# Altium footprint library TitansLib.PcbLib: 333 footprints (part 20 of 21)
Each footprint in its own frame and in the unit in brackets; x right, y up, seen from the top. Pads: shape width x height; smd on the part's side, far side on the other; paste and mask are expansions set on the pad; w line width, h text height; cw(c..) or ccw(c..) is an arc to the next point about the centre after c.
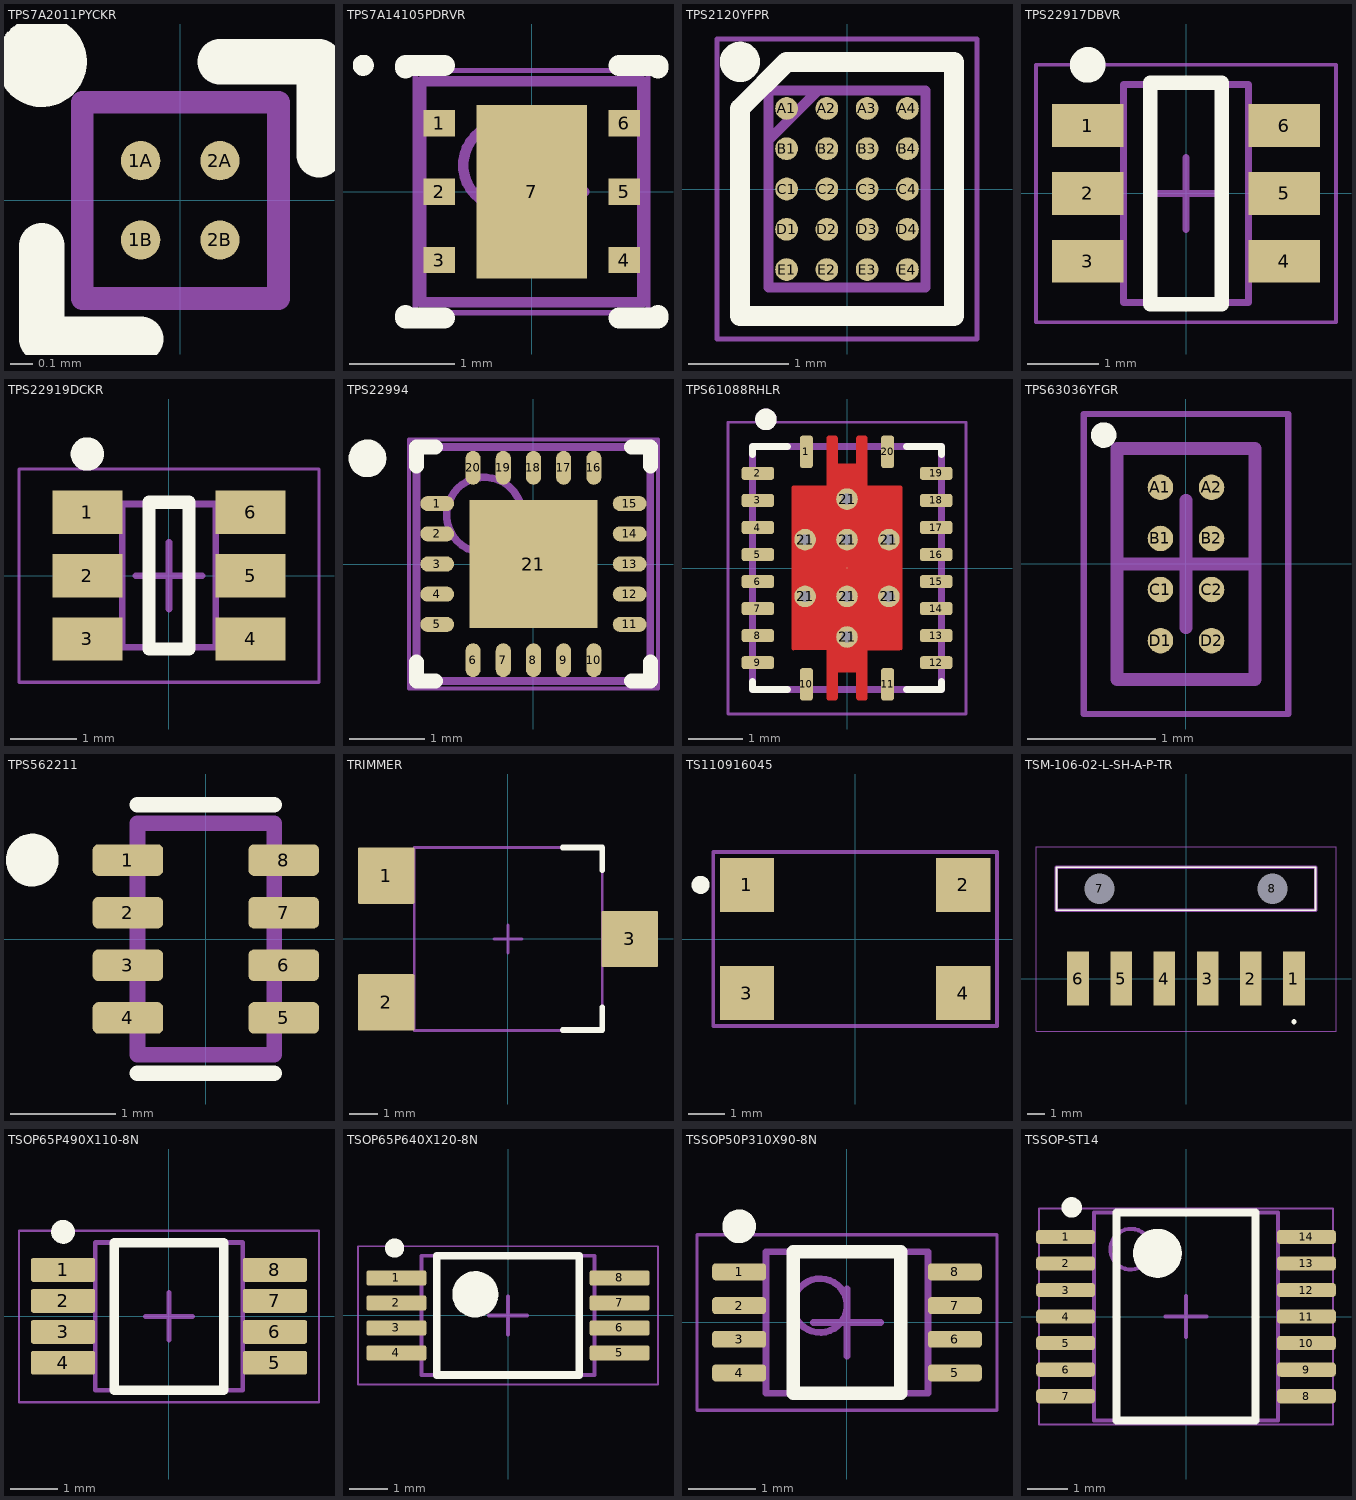
[diagram p19: the footprints below, top view; thin cyan lines are the x and y axes]

## TPS7A2011PYCKR [mm]
pads (4):
  round 0.173 smd: 1A(-0.175,0.175) 1B(-0.175,-0.175) 2A(0.175,0.175) 2B(0.175,-0.175)
Top Overlay:
  circle w0.2: c-0.612,0.612 r0.1
  lines w0.2: -0.612,-0.611 -0.612,-0.2 ; -0.611,-0.612 -0.175,-0.612 ; 0.175,0.612 0.611,0.612 ; 0.612,0.2 0.612,0.611
Mechanical 15:
  lines w0.1: -0.433,-0.433 0.433,-0.433 0.433,0.433 -0.433,0.433 -0.433,-0.433

## TPS7A14105PDRVR [mm] "PSON, 6-Leads, Body 2,00x2,00mm, Pitch 0,65mm, Thermal Pad 1,65x1,05mm, IPC High Density"
height 0.8
pads (7):
  rect 0.3x0.25 smd: 1(-0.88,0.65) 2(-0.88,0) 3(-0.88,-0.65) 4(0.88,-0.65) 5(0.88,0) 6(0.88,0.65)
  rect 1.05x1.65 smd: 7(0,0)
Top Overlay:
  circle w0.1: c-1.6,1.2 r0.05
  lines w0.2: -1.2,-1.175 -1.2,-1.2 -0.83,-1.2 ; -1.2,1.175 -1.2,1.2 -0.83,1.2 ; 0.83,-1.2 1.2,-1.2 1.2,-1.175 ; 0.83,1.2 1.2,1.2 1.2,1.175
Top Courtyard:
  lines w0.05: -1.105,-1.15 1.105,-1.15 1.105,1.15 -1.105,1.15 -1.105,-1.15
  lines w0.1: -0.5,0 0.5,0 ; 0,-0.5 0,0.5
Top Assembly:
  circle w0.1: c-0.25,0.25 r0.4
  lines w0.1: -1.05,-1.05 1.05,-1.05 1.05,1.05 -1.05,1.05 -1.05,-1.05
3D body "TPS7A14105PDRVR_2.step": height 0.8, standoff 0, extent -1.051,-1.05 1.051,1.05

## TPS2120YFPR [mm]
pads (20):
  round 0.226 smd: A1(-0.6,0.8) A2(-0.2,0.8) A3(0.2,0.8) A4(0.6,0.8) B1(-0.6,0.4) B2(-0.2,0.4) B3(0.2,0.4) B4(0.6,0.4) C1(-0.6,0) C2(-0.2,0) C3(0.2,0) C4(0.6,0) D1(-0.6,-0.4) D2(-0.2,-0.4) D3(0.2,-0.4) D4(0.6,-0.4) E1(-0.6,-0.8) E2(-0.2,-0.8) E3(0.2,-0.8) E4(0.6,-0.8)
Top Overlay:
  circle w0.2: c-1.063,1.263 r0.1
  lines w0.2: -1.063,-1.263 -1.063,0.8 -0.6,1.263 1.063,1.263 1.063,-1.263 -1.063,-1.263
Bottom Assembly:
  lines w0.05: -1.29,-1.49 -1.29,1.49 1.29,1.49 1.29,-1.49 -1.29,-1.49
Mechanical 15:
  lines w0.1: -0.78,0.485 -0.285,0.98 ; -0.78,-0.98 -0.78,0.98 0.78,0.98 0.78,-0.98 -0.78,-0.98
3D body "TPS2120YFPR.stp": height 0.5, standoff 0, extent -0.78,-0.98 0.78,0.98

## TPS22917DBVR [mm] "SOT23, 6-Leads, Body 2,90x2,80mm, Pitch 0,95mm, IPC Medium Density"
height 1.45
pads (6):
  rect 1x0.6 smd: 1(-1.375,0.95) 2(-1.375,0) 3(-1.375,-0.95) 4(1.375,-0.95) 5(1.375,0) 6(1.375,0.95)
Top Overlay:
  circle w0.25: c-1.375,1.8 r0.125
  lines w0.2: -0.5,-1.55 -0.5,1.55 0.5,1.55 0.5,-1.55 -0.5,-1.55
Top Courtyard:
  lines w0.05: -2.1,-1.8 2.1,-1.8 2.1,1.8 -2.1,1.8 -2.1,-1.8
  lines w0.1: -0.5,0 0.5,0 ; 0,-0.5 0,0.5
Top Assembly:
  lines w0.1: -0.875,-1.525 0.875,-1.525 0.875,1.525 -0.875,1.525 -0.875,-1.525
3D body "TPS22917DBVR.step": height 1.45, standoff 0, extent -1.5,-1.525 1.5,1.525

## TPS22919DCKR [mm] "SOT23, 6-Leads, Body 2,00x2,10mm, Pitch 0,95mm, IPC Low Density"
height 1.1
pads (6):
  rect 1.05x0.65 smd: 1(-1.225,0.95) 2(-1.225,0) 3(-1.225,-0.95) 4(1.225,-0.95) 5(1.225,0) 6(1.225,0.95)
Top Overlay:
  circle w0.25: c-1.225,1.825 r0.125
  lines w0.2: -0.3,-1.1 -0.3,1.1 0.3,1.1 0.3,-1.1 -0.3,-1.1
Top Courtyard:
  lines w0.05: -2.25,-1.6 2.25,-1.6 2.25,1.6 -2.25,1.6 -2.25,-1.6
  lines w0.1: -0.5,0 0.5,0 ; 0,-0.5 0,0.5
Top Assembly:
  lines w0.1: -0.7,-1.075 0.7,-1.075 0.7,1.075 -0.7,1.075 -0.7,-1.075
3D body "TPS22919DCKR.step": height 1.1, standoff 0, extent -1.1,-1.205 1.1,1.205

## TPS22994 [mm] "PQFN, 20-Leads, Body 3,00x3,00mm, Pitch 0,40mm, Thermal Pad 1,70x1,70mm, IPC High Density"
height 0.8
pads (21):
  oval 0.45x0.2 smd: 1(-1.275,0.8) 2(-1.275,0.4) 3(-1.275,0) 4(-1.275,-0.4) 5(-1.275,-0.8) 11(1.275,-0.8) 12(1.275,-0.4) 13(1.275,0) 14(1.275,0.4) 15(1.275,0.8)
  oval 0.2x0.45 smd: 6(-0.8,-1.275) 7(-0.4,-1.275) 8(0,-1.275) 9(0.4,-1.275) 10(0.8,-1.275) 16(0.8,1.275) 17(0.4,1.275) 18(0,1.275) 19(-0.4,1.275) 20(-0.8,1.275)
  rect 1.7x1.7 smd: 21(0,0)
Top Overlay:
  circle w0.25: c-2.2,1.4 r0.125
  lines w0.2: -1.55,-1.3 -1.55,-1.55 -1.3,-1.55 ; -1.55,1.3 -1.55,1.55 -1.3,1.55 ; 1.3,-1.55 1.55,-1.55 1.55,-1.3 ; 1.3,1.55 1.55,1.55 1.55,1.3
Top Courtyard:
  lines w0.05: -1.65,-1.65 -1.65,1.65 1.65,1.65 1.65,-1.65 -1.65,-1.65
  lines w0.1: -0.5,0 0.5,0 ; 0,-0.5 0,0.5
Top Assembly:
  circle w0.1: c-0.65,0.65 r0.5
  lines w0.1: -1.55,-1.55 -1.55,1.55 1.55,1.55 1.55,-1.55 -1.55,-1.55
3D body "TPS22994.step": height 0.8, standoff 0, extent -1.55,-1.55 1.55,1.55

## TPS61088RHLR [mm]
pads (29):
  rrect42% 0.24x0.6 smd mask+0.05: 1(-0.75,2.15) 10(-0.75,-2.15) 11(0.75,-2.15) 20(0.75,2.15)
  rrect42% 0.6x0.24 smd mask+0.05: 2(-1.65,1.75) 3(-1.65,1.25) 4(-1.65,0.75) 5(-1.65,0.25) 6(-1.65,-0.25) 7(-1.65,-0.75) 8(-1.65,-1.25) 9(-1.65,-1.75) 12(1.65,-1.75) 13(1.65,-1.25) 14(1.65,-0.75) 15(1.65,-0.25) 16(1.65,0.25) 17(1.65,0.75) 18(1.65,1.25) 19(1.65,1.75)
  round 0.4 hole 0.2 mask+0.102: 21(-0.775,-0.525) 21(-0.775,0.525) 21(0,-1.275) 21(0,-0.525) 21(0,0.525) 21(0,1.275) 21(0.775,-0.525) 21(0.775,0.525)
  round 0.025 smd paste-3 mask+0.05: 21(0,0)
Top Layer:
  region: 380 vertices and 0 holes, not listed, extent -1.025,-2.45 1.025,2.45
Top Overlay:
  circle w0.2: c-1.5,2.75 r0.1
  lines w0.127: -1.75,-2.1 -1.75,-2.25 -1.1,-2.25 ; -1.75,2.1 -1.75,2.25 -1.1,2.25 ; 1.1,-2.25 1.75,-2.25 1.75,-2.1 ; 1.1,2.25 1.75,2.25 1.75,2.1
Top Paste:
  drawing of 8 lines, arcs and shapes, not listed
Top Solder:
  drawing of 1 lines, arcs and shapes, not listed
Top Assembly:
  lines w0.1: -1.75,-2.25 1.75,-2.25 1.75,2.25 -1.75,2.25 -1.75,-2.25
  text ".Designator" at -0.653,-0.178 h1
Mechanical 13:
  circle w0.2: c-1.5,2.75 r0.1
  lines w0.127: -1.75,-2.25 -1.75,2.25 1.75,2.25 1.75,-2.25 -1.75,-2.25
Mechanical 15:
  lines w0.05: -2.2,-2.7 2.2,-2.7 2.2,2.7 -2.2,2.7 -2.2,-2.7
3D body "TPS61088RHLR.step": height 1.01, standoff 0.01, extent -1.75,-2.25 1.75,2.25

## TPS63036YFGR [mm] "BGA, 8-Leads, Body 1,08x1,81mmx0,63mm, Pitch 0,40mm"
height 0.63
pads (8):
  round 0.2 smd: A1(-0.2,0.6) A2(0.2,0.6) B1(-0.2,0.2) B2(0.2,0.2) C1(-0.2,-0.2) C2(0.2,-0.2) D1(-0.2,-0.6) D2(0.2,-0.6)
Top Overlay:
  circle w0.1: c-0.645,1.01 r0.05
Top Courtyard:
  lines w0.05: -0.8,-1.175 0.8,-1.175 0.8,1.175 -0.8,1.175 -0.8,-1.175
  lines w0.1: -0.5,0 0.5,0 ; 0,-0.5 0,0.5
Top Assembly:
  lines w0.1: -0.54,-0.905 0.54,-0.905 0.54,0.905 -0.54,0.905 -0.54,-0.905
3D body "TPS63036YFGR.step": height 0.63, standoff 0, extent -0.54,-0.905 0.54,0.905

## TPS562211 [mm]
pads (8):
  rrect35% 0.67x0.3 smd paste+0 mask+0.05: 1(-0.74,0.75) 2(-0.74,0.25) 3(-0.74,-0.25) 4(-0.74,-0.75) 5(0.74,-0.75) 6(0.74,-0.25) 7(0.74,0.25) 8(0.74,0.75)
Top Overlay:
  circle w0.25: c-1.65,0.75 r0.125
  lines w0.15: -0.65,-1.275 0.65,-1.275 ; -0.65,1.275 0.65,1.275
Mechanical 13:
  lines w0.15: -0.65,-1.1 -0.65,1.1 0.65,1.1 0.65,-1.1 -0.65,-1.1
3D body "TPS562211DRLR.stp": height 0.6, standoff 0, extent -0.782,-1.097 0.818,1.003

## TRIMMER [mm]
height 1.25
pads (3):
  rrect4% 2x2 smd: 1(-4.325,2.25) 2(-4.325,-2.25) 3(4.325,0)
Top Overlay:
  lines w0.2: 1.943,-3.229 3.343,-3.229 3.343,-2.429 ; 1.943,3.247 3.343,3.247 3.343,2.447
Top Courtyard:
  lines w0.05: -3.33,-3.25 3.343,-3.25 3.343,3.25 -3.33,3.25 -3.33,-3.25
  lines w0.1: -0.5,0 0.5,0 ; 0,-0.5 0,0.5
Top Assembly:
  lines w0.1: -3.33,-3.25 3.343,-3.25 3.343,3.25 -3.33,3.25 -3.33,-3.25
  text ".Designator" at -2.225,4.013 h1
3D body "06TR4F.stp": height 4.15, standoff -0.05, extent -4.894,-3.253 4.906,3.25

## TS110916045 [mm]
pads (4):
  rect 1.5x1.5 smd: 1(-3,1.5) 2(3,1.5) 3(-3,-1.5) 4(3,-1.5)
Top Overlay:
  circle w0.3: c-4.287,1.502 r0.1
Top Courtyard:
  lines w0.1: -3.937,-2.413 3.937,-2.413 3.937,2.413 -3.937,2.413 -3.937,-2.413
3D body "PTS647SM38SMTR2_LFS.stp": height 3.8, standoff 0, extent -3.279,-2.241 3.221,2.259

## TSM-106-02-L-SH-A-P-TR [mm]
pads (8):
  rect 1.27x3.18 smd: 1(6.35,0) 2(3.81,0) 3(1.27,0) 4(-1.27,0) 5(-3.81,0) 6(-6.35,0)
  round 0.89 hole 1.78 unplated: 7(-5.08,5.28) 8(5.08,5.28)
Top Overlay:
  circle w0.2: c6.35,-2.54 r0.05
  lines w0.1: -7.62,4.01 -7.62,6.55 7.62,6.55 7.62,4.01 -7.62,4.01
Mechanical 13:
  lines w0.2: -7.62,4.01 -7.62,6.55 7.62,6.55 7.62,4.01 -7.62,4.01
Mechanical 15:
  lines w0.05: -8.82,-3.1 -8.82,7.75 8.82,7.75 8.82,-3.1 -8.82,-3.1
3D body "TSM-106-02-L-SH-A-P-TR.stp": height 4.32, standoff -1.4, extent -7.595,-0.796 7.645,14.698

## TSOP65P490X110-8N [mm] "TSOP, 8-Leads, Body 3.00x3.00mm, Pitch 0.65mm, IPC Medium Density"
height 1.1
pads (8):
  rrect20% 1.35x0.5 smd mask+0.05: 1(-2.225,0.975) 2(-2.225,0.325) 3(-2.225,-0.325) 4(-2.225,-0.975) 5(2.225,-0.975) 6(2.225,-0.325) 7(2.225,0.325) 8(2.225,0.975)
Top Overlay:
  circle w0.25: c-2.225,1.775 r0.125
  lines w0.2: -1.15,-1.55 -1.15,1.55 1.15,1.55 1.15,-1.55 -1.15,-1.55
Top Courtyard:
  lines w0.05: -3.15,-1.8 -3.15,1.8 3.15,1.8 3.15,-1.8 -3.15,-1.8
  lines w0.1: -0.5,0 0.5,0 ; 0,-0.5 0,0.5
Top Assembly:
  lines w0.1: -1.55,-1.55 -1.55,1.55 1.55,1.55 1.55,-1.55 -1.55,-1.55
  text ".Designator" at -0.659,0.108 h1
3D body: height 1.1, standoff 0.05, extent -1.55,-1.55 1.55,1.55

## TSOP65P640X120-8N [mm] "TSOP, 8-Leads, Body 3.00x4.40mm, Pitch 0.65mm, IPC Medium Density"
height 1.2
pads (8):
  rrect25% 1.55x0.4 smd mask+0.05: 1(-2.9,0.975) 2(-2.9,0.325) 3(-2.9,-0.325) 4(-2.9,-0.975) 5(2.9,-0.975) 6(2.9,-0.325) 7(2.9,0.325) 8(2.9,0.975)
Top Overlay:
  circle w0.6: c-0.85,0.55 r0.3
  circle w0.25: c-2.95,1.75 r0.125
  lines w0.2: -1.85,-1.55 1.85,-1.55 1.85,1.55 -1.85,1.55 -1.85,-1.55
Top Courtyard:
  lines w0.05: -3.9,-1.8 3.9,-1.8 3.9,1.8 -3.9,1.8 -3.9,-1.8
  lines w0.1: -0.5,0 0.5,0 ; 0,-0.5 0,0.5
Top Assembly:
  lines w0.1: -2.25,-1.55 2.25,-1.55 2.25,1.55 -2.25,1.55 -2.25,-1.55
  text ".Designator" at -1.181,-0.22 h1
3D body: height 1.2, standoff 0.05, extent -2.25,-1.55 2.25,1.55

## TSSOP50P310X90-8N [mm] "TSSOP, 8-Leads, Body 2.00x2.30mm, Pitch 0.50mm, IPC Medium Density"
height 0.9
pads (8):
  rrect40% 0.8x0.25 smd mask+0.05: 1(-1.6,0.75) 2(-1.6,0.25) 3(-1.6,-0.25) 4(-1.6,-0.75) 5(1.6,-0.75) 6(1.6,-0.25) 7(1.6,0.25) 8(1.6,0.75)
Top Overlay:
  circle w0.25: c-1.6,1.425 r0.125
  lines w0.2: -0.8,-1.05 0.8,-1.05 0.8,1.05 -0.8,1.05 -0.8,-1.05
Top Courtyard:
  lines w0.05: -2.225,-1.3 2.225,-1.3 2.225,1.3 -2.225,1.3 -2.225,-1.3
  lines w0.1: -0.5,0 0.5,0 ; 0,-0.5 0,0.5
Top Assembly:
  circle w0.1: c-0.4,0.25 r0.4
  lines w0.1: -1.2,-1.05 1.2,-1.05 1.2,1.05 -1.2,1.05 -1.2,-1.05
3D body "TSSOP50P310X90-8N.step": height 0.9, standoff 0, extent -1.549,-1.05 1.549,1.05

## TSSOP-ST14 [mm] "TSOP, 14-Leads, Body 5x4.4mm, Pitch 0.65mm, IPC High Density"
height 1.2
pads (14):
  rrect50% 1.45x0.35 smd mask+0.07: 1(-2.95,1.95) 2(-2.95,1.3) 3(-2.95,0.65) 4(-2.95,0) 5(-2.95,-0.65) 6(-2.95,-1.3) 7(-2.95,-1.95) 8(2.95,-1.95) 9(2.95,-1.3) 10(2.95,-0.65) 11(2.95,0) 12(2.95,0.65) 13(2.95,1.3) 14(2.95,1.95)
Top Overlay:
  circle w0.6: c-0.7,1.55 r0.3
  circle w0.25: c-2.8,2.675 r0.125
  lines w0.2: -1.7,-2.55 1.7,-2.55 1.7,2.55 -1.7,2.55 -1.7,-2.55
Top Assembly:
  lines w0.1: -2.25,-2.55 2.25,-2.55 2.25,2.55 -2.25,2.55 -2.25,-2.55
  text ".Designator" at -1,-0.462 h1
Mechanical 13:
  circle w0.1: c-1.35,1.65 r0.5
  lines w0.1: -2.25,-2.55 2.25,-2.55 2.25,2.55 -2.25,2.55 -2.25,-2.55
Mechanical 15:
  lines w0.05: -3.6,-2.65 3.6,-2.65 3.6,2.65 -3.6,2.65 -3.6,-2.65
  lines w0.1: -0.5,0 0.5,0 ; 0,-0.5 0,0.5
3D body: height 1.2, standoff 0.05, extent -2.25,-2.55 2.25,2.55